# EAGLE library part IC_BQ24195 (library dp_devices.v6)
I2C Controlled 2.5A/4.5A Single Cell Charger with 5.1V 1.3A/2.1A Synchronous Boost Operation http://www.ti.com/product/bq24195
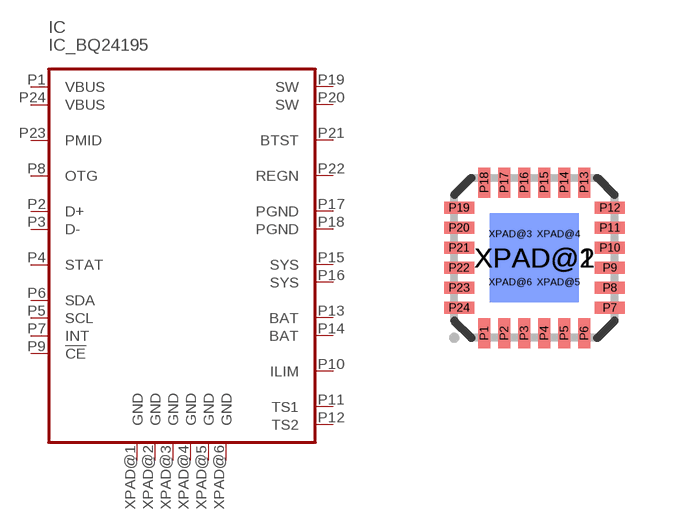
[diagram p157: symbol with the pads of QFN24_4X4; footprint QFN24_4X4]

Designator prefix IC

## IC_BQ24195  [QFN24_4X4]
P1  VBUS  pwr
P2  D+
P3  D-
P4  STAT  out
P5  SCL  in
P6  SDA
P7  INT
P8  OTG
P9  !CE
P10  ILIM
P11  TS1
P12  TS2
P13  BAT  pwr
P14  BAT  pwr
P15  SYS
P16  SYS
P17  PGND  sup
P18  PGND  sup
P19  SW
P20  SW
P21  BTST
P22  REGN
P23  PMID
P24  VBUS  pwr
XPAD@1  GND  sup
XPAD@2  GND  sup
XPAD@3  GND  sup
XPAD@4  GND  sup
XPAD@5  GND  sup
XPAD@6  GND  sup

## Footprint QFN24_4X4 (pad centres in mm)
QFN 24 Body: 4 x 4 mm Pitch: 0.50 mm Based on: MAXIM's G2044-3 <http://pdfserv.maximintegrated.com/package_dwgs/21-0106.PDF>
smd 0.3 x 0.75: P1 -1.25,-1.885; P2 -0.75,-1.885; P3 -0.25,-1.885; P4 0.25,-1.885; P5 0.75,-1.885; P6 1.25,-1.885; P13 1.25,1.885; P14 0.75,1.885; P15 0.25,1.885; P16 -0.25,1.885; P17 -0.75,1.885; P18 -1.25,1.885
smd 0.75 x 0.3: P7 1.885,-1.25; P8 1.885,-0.75; P9 1.885,-0.25; P10 1.885,0.25; P11 1.885,0.75; P12 1.885,1.25; P19 -1.885,1.25; P20 -1.885,0.75; P21 -1.885,0.25; P22 -1.885,-0.25; P23 -1.885,-0.75; P24 -1.885,-1.25
smd 2.22 x 2.22: XPAD@1 0,0
smd 2.22 x 2.22 bottom: XPAD@2 0,0
drill 0.305: XPAD@3 -0.602,0.602; XPAD@4 0.602,0.602; XPAD@5 0.602,-0.602; XPAD@6 -0.602,-0.602